# EAGLE library part BS612 (library BS612)
Senba BS612 PIR, LCSC C389589. Needs the SB-F-02 Fresnel lens.
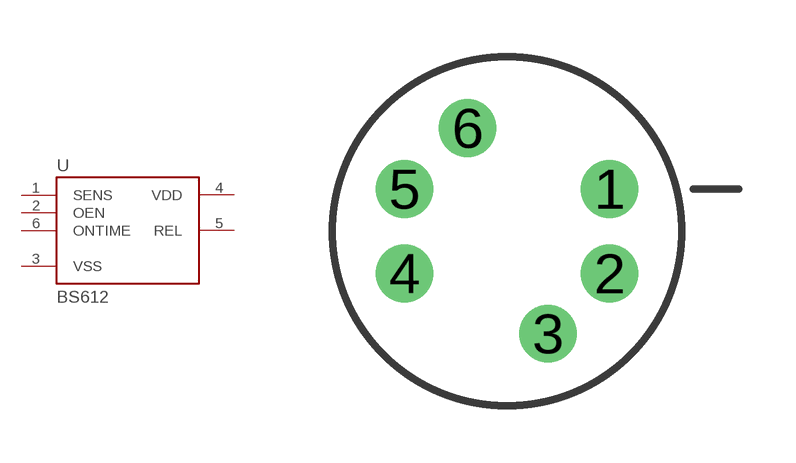
[diagram p0: symbol with the pads of SENSORM-TH_BS612; footprint SENSORM-TH_BS612]

Designator prefix U

## BS612 (LCSC: C389589; MF: Senba Sensing Tech; MPN: BS612; VALUE: BS612)  [SENSORM-TH_BS612]
1  SENS  in
2  OEN  in
3  VSS  pwr
4  VDD  pwr
5  REL  out
6  ONTIME  in

## Footprint SENSORM-TH_BS612 (pad centres in mm)
BS612 PIR, TO-5 6-pin, dia 9.2 mm can, 0.914 mm drills
drill 0.914 pad 1.524 round: 1 2.7,1.115; 2 2.7,-1.115; 3 1.08,-2.7; 4 -2.7,-1.115; 5 -2.7,1.115; 6 -1.04,2.72